# Altium footprint library Connectors.PcbLib: 60 footprints (part 2 of 4)
Each footprint in its own frame and in the unit in brackets; x right, y up, seen from the top. Pads: shape width x height; smd on the part's side, far side on the other; paste and mask are expansions set on the pad; w line width, h text height; cw(c..) or ccw(c..) is an arc to the next point about the centre after c.
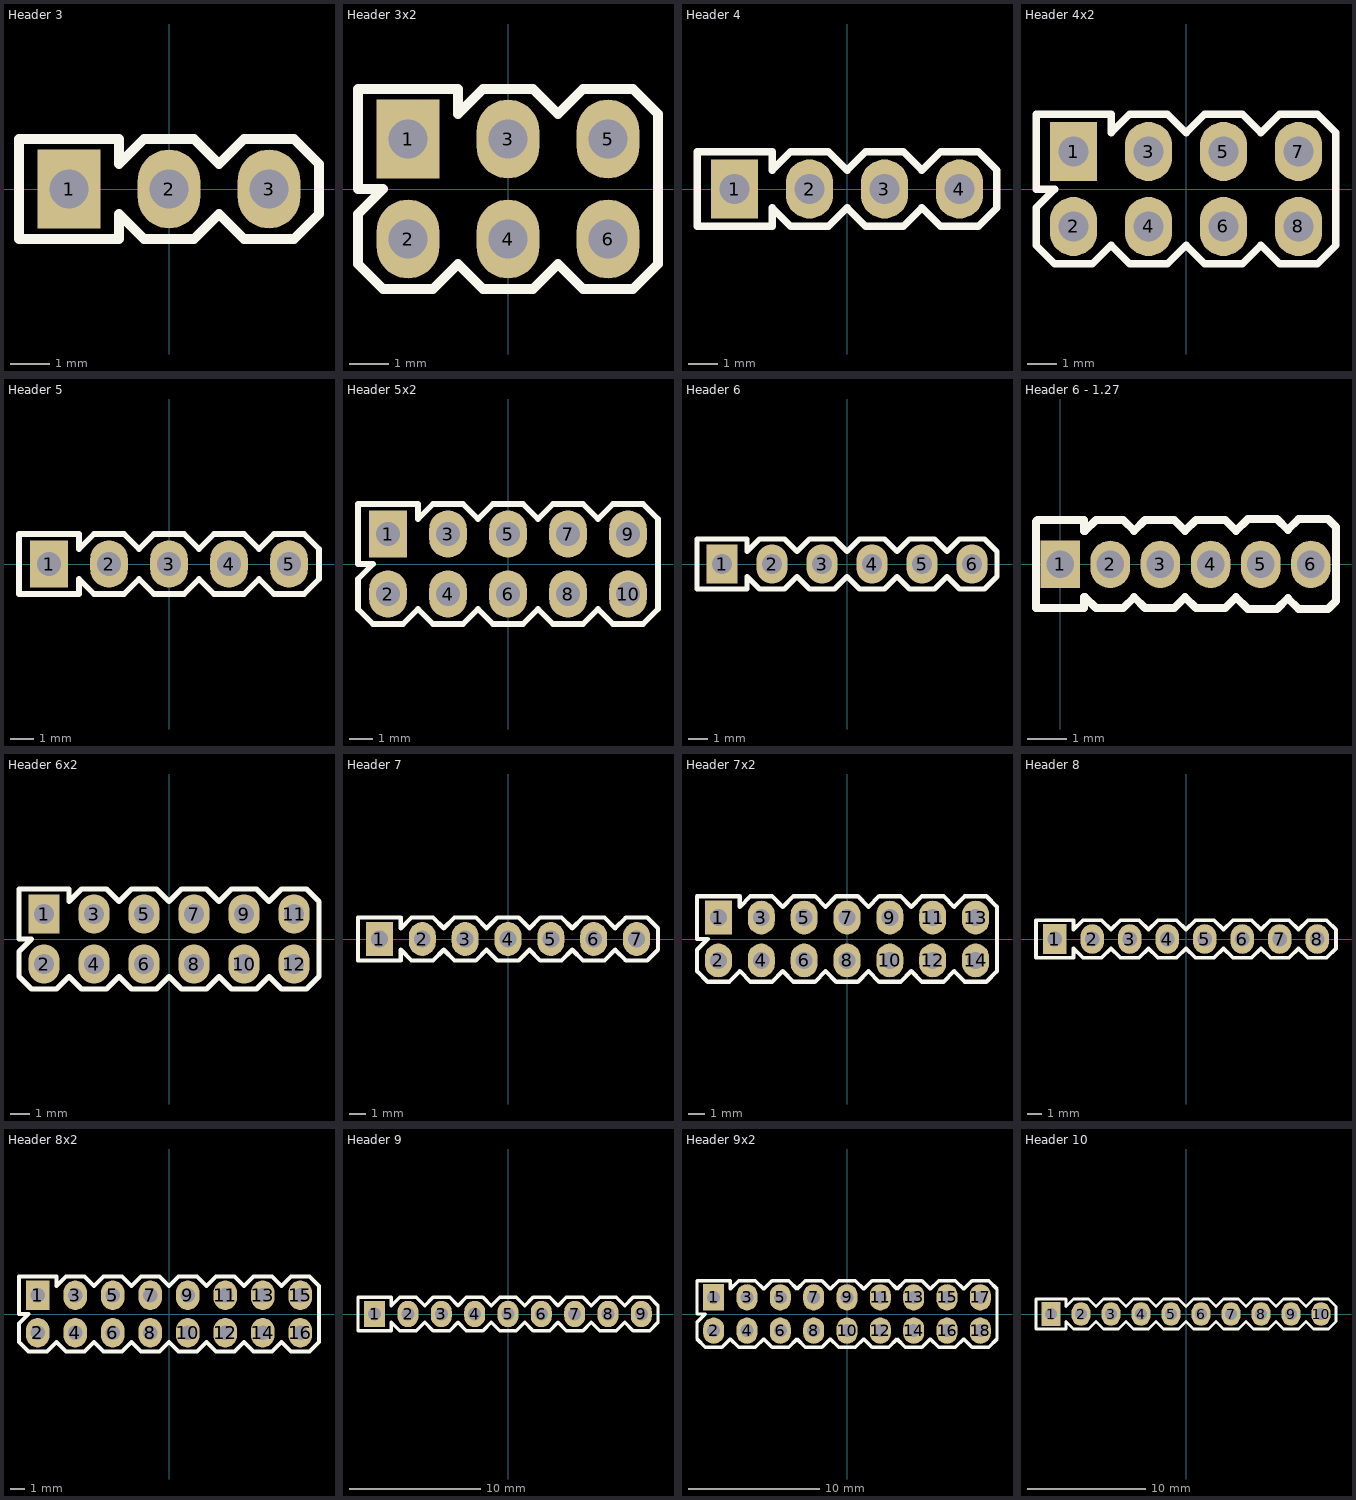
[diagram p1: the footprints below, top view; thin cyan lines are the x and y axes]

## Header 3 [mm]
pads (3):
  rect 1.6x2 hole 1: 1(-2.54,0)
  oval 1.6x2 hole 1: 2(0,0) 3(2.54,0)
Top Overlay:
  lines w0.254: -3.81,-1.27 -3.81,1.27 -1.27,1.27 -1.27,0.635 -0.635,1.27 0.635,1.27 1.27,0.635 1.905,1.27 3.175,1.27 3.81,0.635 3.81,-0.635 3.175,-1.27 1.905,-1.27 1.27,-0.635 0.635,-1.27 -0.635,-1.27 -1.27,-0.635 -1.27,-1.27 -3.81,-1.27
3D body: height 8.2, standoff -3, extent -3.771,-1.312 3.849,1.184

## Header 3x2 [mm]
pads (6):
  rect 1.6x2 hole 1: 1(-2.54,1.27)
  oval 1.6x2 hole 1: 2(-2.54,-1.27) 3(0,1.27) 4(0,-1.27) 5(2.54,1.27) 6(2.54,-1.27)
Top Overlay:
  lines w0.254: -3.81,-1.905 -3.175,-2.54 -1.905,-2.54 -1.27,-1.905 -0.635,-2.54 0.635,-2.54 1.27,-1.905 1.905,-2.54 3.175,-2.54 3.81,-1.905 3.81,-0.635 3.81,0.635 3.81,1.905 3.175,2.54 1.905,2.54 1.27,1.905 0.635,2.54 -0.635,2.54 -1.27,1.905 -1.27,2.54 -3.81,2.54 -3.81,0 -3.175,0 -3.81,-0.635 -3.81,-1.905
3D body: height 8.5, standoff -3, extent -3.81,-2.54 3.81,2.54

## Header 4 [mm]
pads (4):
  rect 1.6x2 hole 1: 1(-3.81,0)
  oval 1.6x2 hole 1: 2(-1.27,0) 3(1.27,0) 4(3.81,0)
Top Overlay:
  lines w0.254: -5.08,-1.27 -5.08,1.27 -2.54,1.27 -2.54,0.635 -1.905,1.27 -0.635,1.27 0,0.635 0.635,1.27 1.905,1.27 2.54,0.635 3.175,1.27 4.445,1.27 5.08,0.635 5.08,-0.635 4.445,-1.27 3.175,-1.27 2.54,-0.635 1.905,-1.27 0.635,-1.27 0,-0.635 -0.635,-1.27 -1.905,-1.27 -2.54,-0.635 -2.54,-1.27 -5.08,-1.27
3D body: height 8.2, standoff -3, extent -4.953,-1.27 5.207,1.226

## Header 4x2 [mm]
pads (8):
  rect 1.6x2 hole 1: 1(-3.81,1.27)
  oval 1.6x2 hole 1: 2(-3.81,-1.27) 3(-1.27,1.27) 4(-1.27,-1.27) 5(1.27,1.27) 6(1.27,-1.27) 7(3.81,1.27) 8(3.81,-1.27)
Top Overlay:
  lines w0.254: -5.08,-1.905 -5.08,-0.635 -4.445,0 -5.08,0 -5.08,2.54 -2.54,2.54 -2.54,1.905 -1.905,2.54 -0.635,2.54 0,1.905 0.635,2.54 1.905,2.54 2.54,1.905 3.175,2.54 4.445,2.54 5.08,1.905 5.08,0.635 5.08,-0.635 5.08,-1.905 4.445,-2.54 3.175,-2.54 2.54,-1.905 1.905,-2.54 0.635,-2.54 0,-1.905 -0.635,-2.54 -1.905,-2.54 -2.54,-1.905 -3.175,-2.54 -4.445,-2.54 -5.08,-1.905
3D body: height 8.5, standoff -3, extent -5.08,-2.54 5.08,2.54

## Header 5 [mm]
pads (5):
  rect 1.6x2 hole 1: 1(-5.08,0)
  oval 1.6x2 hole 1: 2(-2.54,0) 3(0,0) 4(2.54,0) 5(5.08,0)
Top Overlay:
  lines w0.254: -6.35,-1.27 -6.35,1.27 -3.81,1.27 -3.81,0.635 -3.175,1.27 -1.905,1.27 -1.27,0.635 -0.635,1.27 0.635,1.27 1.27,0.635 1.905,1.27 3.175,1.27 3.81,0.635 4.445,1.27 5.715,1.27 6.35,0.635 6.35,-0.635 5.715,-1.27 4.445,-1.27 3.81,-0.635 3.175,-1.27 1.905,-1.27 1.27,-0.635 0.635,-1.27 -0.635,-1.27 -1.27,-0.635 -1.905,-1.27 -3.175,-1.27 -3.81,-0.635 -3.81,-1.27 -6.35,-1.27
3D body: height 8.2, standoff -3, extent -6.25,-1.251 6.45,1.245

## Header 5x2 [mm]
pads (10):
  rect 1.6x2 hole 1: 1(-5.08,1.27)
  oval 1.6x2 hole 1: 2(-5.08,-1.27) 3(-2.54,1.27) 4(-2.54,-1.27) 5(0,1.27) 6(0,-1.27) 7(2.54,1.27) 8(2.54,-1.27) 9(5.08,1.27) 10(5.08,-1.27)
Top Overlay:
  lines w0.254: -6.35,-1.905 -5.715,-2.54 -4.445,-2.54 -3.81,-1.905 -3.175,-2.54 -1.905,-2.54 -1.27,-1.905 -0.635,-2.54 0.635,-2.54 1.27,-1.905 1.905,-2.54 3.175,-2.54 3.81,-1.905 4.445,-2.54 5.715,-2.54 6.35,-1.905 6.35,-0.635 6.35,0.635 6.35,1.905 5.715,2.54 4.445,2.54 3.81,1.905 3.175,2.54 1.905,2.54 1.27,1.905 0.635,2.54 -0.635,2.54 -1.27,1.905 -1.905,2.54 -3.175,2.54 -3.81,1.905 -3.81,2.54 -6.35,2.54 -6.35,0 -5.715,0 -6.35,-0.635 -6.35,-1.905
3D body: height 8.5, standoff -3, extent -6.35,-2.54 6.35,2.54

## Header 6 [mm]
pads (6):
  rect 1.6x2 hole 1: 1(-6.35,0)
  oval 1.6x2 hole 1: 2(-3.81,0) 3(-1.27,0) 4(1.27,0) 5(3.81,0) 6(6.35,0)
Top Overlay:
  lines w0.254: -7.62,-1.27 -5.08,-1.27 -5.08,-0.635 -4.445,-1.27 -3.175,-1.27 -2.54,-0.635 -1.905,-1.27 -0.635,-1.27 0,-0.635 0.635,-1.27 1.905,-1.27 2.54,-0.635 3.175,-1.27 4.445,-1.27 5.08,-0.635 5.715,-1.27 6.985,-1.27 7.62,-0.635 7.62,0.635 6.985,1.27 5.715,1.27 5.08,0.635 4.445,1.27 3.175,1.27 2.54,0.635 1.905,1.27 0.635,1.27 0,0.635 -0.635,1.27 -1.905,1.27 -2.54,0.635 -3.175,1.27 -4.445,1.27 -5.08,0.635 -5.08,1.27 -7.62,1.27 -7.62,-1.27
3D body: height 8.2, standoff -3, extent -7.52,-1.251 7.72,1.245

## Header 6 - 1.27 [mm]
pads (6):
  rect 1x1.2 hole 0.7: 1(0,0)
  oval 1x1.2 hole 0.7: 2(1.27,0) 3(2.54,0) 4(3.81,0) 5(5.08,0) 6(6.35,0)
Top Overlay:
  lines w0.2: 0.61,-0.83 0.61,-1.105 -0.61,-1.105 -0.61,1.09 -0.575,1.125 0.61,1.125 0.61,0.85 ; 0.635,-0.83 0.91,-1.105 1.6,-1.105 1.875,-0.83 2.15,-1.105 2.89,-1.105 3.165,-0.83 3.44,-1.105 4.18,-1.105 4.455,-0.83 4.73,-1.105 ; 0.635,0.85 0.91,1.125 1.6,1.125 1.875,0.85 2.15,1.125 2.89,1.125 3.165,0.85 3.44,1.125 4.18,1.125 4.455,0.85 4.73,1.125 ; 4.75,-1.13 5.49,-1.13 5.765,-0.855 6.04,-1.13 6.78,-1.13 6.985,-0.925 6.985,0.945 6.78,1.15 6.04,1.15 5.765,0.875 5.49,1.15 4.75,1.15
3D body: height 4.86, standoff -2.39, extent -0.65,-1.2 6.97,1.2

## Header 6x2 [mm]
pads (12):
  rect 1.6x2 hole 1: 1(-6.35,1.27)
  oval 1.6x2 hole 1: 2(-6.35,-1.27) 3(-3.81,1.27) 4(-3.81,-1.27) 5(-1.27,1.27) 6(-1.27,-1.27) 7(1.27,1.27) 8(1.27,-1.27) 9(3.81,1.27) 10(3.81,-1.27) 11(6.35,1.27) 12(6.35,-1.27)
Top Overlay:
  lines w0.254: -7.62,-1.905 -7.62,-0.635 -6.985,0 -7.62,0 -7.62,2.54 -5.08,2.54 -5.08,1.905 -4.445,2.54 -3.175,2.54 -2.54,1.905 -1.905,2.54 -0.635,2.54 0,1.905 0.635,2.54 1.905,2.54 2.54,1.905 3.175,2.54 4.445,2.54 5.08,1.905 5.715,2.54 6.985,2.54 7.62,1.905 7.62,0.635 7.62,-0.635 7.62,-1.905 6.985,-2.54 5.715,-2.54 5.08,-1.905 4.445,-2.54 3.175,-2.54 2.54,-1.905 1.905,-2.54 0.635,-2.54 0,-1.905 -0.635,-2.54 -1.905,-2.54 -2.54,-1.905 -3.175,-2.54 -4.445,-2.54 -5.08,-1.905 -5.715,-2.54 -6.985,-2.54 -7.62,-1.905
3D body: height 8.5, standoff -3, extent -7.62,-2.54 7.62,2.54

## Header 7 [mm]
pads (7):
  rect 1.6x2 hole 1: 1(-7.62,0)
  oval 1.6x2 hole 1: 2(-5.08,0) 3(-2.54,0) 4(0,0) 5(2.54,0) 6(5.08,0) 7(7.62,0)
Top Overlay:
  lines w0.254: -8.89,-1.27 -8.89,1.27 -6.35,1.27 -6.35,0.635 -5.715,1.27 -4.445,1.27 -3.81,0.635 -3.175,1.27 -1.905,1.27 -1.27,0.635 -0.635,1.27 0.635,1.27 1.27,0.635 1.905,1.27 3.175,1.27 3.81,0.635 4.445,1.27 5.715,1.27 6.35,0.635 6.985,1.27 8.255,1.27 8.89,0.635 8.89,-0.635 8.255,-1.27 6.985,-1.27 6.35,-0.635 5.715,-1.27 4.445,-1.27 3.81,-0.635 3.175,-1.27 1.905,-1.27 1.27,-0.635 0.635,-1.27 -0.635,-1.27 -1.27,-0.635 -1.905,-1.27 -3.175,-1.27 -3.81,-0.635 -4.445,-1.27 -5.715,-1.27 -6.35,-0.635 -6.35,-1.27 -8.89,-1.27
3D body: height 8.2, standoff -3, extent -8.79,-1.251 8.99,1.245

## Header 7x2 [mm]
pads (14):
  rect 1.6x2 hole 1: 1(-7.62,1.27)
  oval 1.6x2 hole 1: 2(-7.62,-1.27) 3(-5.08,1.27) 4(-5.08,-1.27) 5(-2.54,1.27) 6(-2.54,-1.27) 7(0,1.27) 8(0,-1.27) 9(2.54,1.27) 10(2.54,-1.27) 11(5.08,1.27) 12(5.08,-1.27) 13(7.62,1.27) 14(7.62,-1.27)
Top Overlay:
  lines w0.254: -8.89,-1.905 -8.89,-0.635 -8.255,0 -8.89,0 -8.89,2.54 -6.35,2.54 -6.35,1.905 -5.715,2.54 -4.445,2.54 -3.81,1.905 -3.175,2.54 -1.905,2.54 -1.27,1.905 -0.635,2.54 0.635,2.54 1.27,1.905 1.905,2.54 3.175,2.54 3.81,1.905 4.445,2.54 5.715,2.54 6.35,1.905 6.985,2.54 8.255,2.54 8.89,1.905 8.89,-1.905 8.255,-2.54 6.985,-2.54 6.35,-1.905 5.715,-2.54 4.445,-2.54 3.81,-1.905 3.175,-2.54 1.905,-2.54 1.27,-1.905 0.635,-2.54 -0.635,-2.54 -1.27,-1.905 -1.905,-2.54 -3.175,-2.54 -3.81,-1.905 -4.445,-2.54 -5.715,-2.54 -6.35,-1.905 -6.985,-2.54 -8.255,-2.54 -8.89,-1.905
3D body: height 8.5, standoff -3, extent -8.89,-2.54 8.89,2.54

## Header 8 [mm]
pads (8):
  rect 1.6x2 hole 1: 1(-8.89,0)
  oval 1.6x2 hole 1: 2(-6.35,0) 3(-3.81,0) 4(-1.27,0) 5(1.27,0) 6(3.81,0) 7(6.35,0) 8(8.89,0)
Top Overlay:
  lines w0.254: -10.16,-1.27 -10.16,1.27 -7.62,1.27 -7.62,0.635 -6.985,1.27 -5.715,1.27 -5.08,0.635 -4.445,1.27 -3.175,1.27 -2.54,0.635 -1.905,1.27 -0.635,1.27 0,0.635 0.635,1.27 1.905,1.27 2.54,0.635 3.175,1.27 4.445,1.27 5.08,0.635 5.715,1.27 6.985,1.27 7.62,0.635 8.255,1.27 9.525,1.27 10.16,0.635 10.16,-0.635 9.525,-1.27 8.255,-1.27 7.62,-0.635 6.985,-1.27 5.715,-1.27 5.08,-0.635 4.445,-1.27 3.175,-1.27 2.54,-0.635 1.905,-1.27 0.635,-1.27 0,-0.635 -0.635,-1.27 -1.905,-1.27 -2.54,-0.635 -3.175,-1.27 -4.445,-1.27 -5.08,-0.635 -5.715,-1.27 -6.985,-1.27 -7.62,-0.635 -7.62,-1.27 -10.16,-1.27
3D body: height 8.2, standoff -3, extent -10.06,-1.251 10.26,1.245

## Header 8x2 [mm]
pads (16):
  rect 1.6x2 hole 1: 1(-8.89,1.27)
  oval 1.6x2 hole 1: 2(-8.89,-1.27) 3(-6.35,1.27) 4(-6.35,-1.27) 5(-3.81,1.27) 6(-3.81,-1.27) 7(-1.27,1.27) 8(-1.27,-1.27) 9(1.27,1.27) 10(1.27,-1.27) 11(3.81,1.27) 12(3.81,-1.27) 13(6.35,1.27) 14(6.35,-1.27) 15(8.89,1.27) 16(8.89,-1.27)
Top Overlay:
  lines w0.254: -10.16,-1.905 -9.525,-2.54 -8.255,-2.54 -7.62,-1.905 -6.985,-2.54 -5.715,-2.54 -5.08,-1.905 -4.445,-2.54 -3.175,-2.54 -2.54,-1.905 -1.905,-2.54 -0.635,-2.54 0,-1.905 0.635,-2.54 1.905,-2.54 2.54,-1.905 3.175,-2.54 4.445,-2.54 5.08,-1.905 5.715,-2.54 6.985,-2.54 7.62,-1.905 8.255,-2.54 9.525,-2.54 10.16,-1.905 10.16,1.905 9.525,2.54 8.255,2.54 7.62,1.905 6.985,2.54 5.715,2.54 5.08,1.905 4.445,2.54 3.175,2.54 2.54,1.905 1.905,2.54 0.635,2.54 0,1.905 -0.635,2.54 -1.905,2.54 -2.54,1.905 -3.175,2.54 -4.445,2.54 -5.08,1.905 -5.715,2.54 -6.985,2.54 -7.62,1.905 -7.62,2.54 -10.16,2.54 -10.16,0 -9.525,0 -10.16,-0.635 -10.16,-1.905
3D body: height 8.5, standoff -3, extent -10.16,-2.54 10.16,2.54

## Header 9 [mm]
pads (9):
  rect 1.6x2 hole 1: 1(-10.16,0)
  oval 1.6x2 hole 1: 2(-7.62,0) 3(-5.08,0) 4(-2.54,0) 5(0,0) 6(2.54,0) 7(5.08,0) 8(7.62,0) 9(10.16,0)
Top Overlay:
  lines w0.254: -11.43,-1.27 -11.43,1.27 -8.89,1.27 -8.89,0.635 -8.255,1.27 -6.985,1.27 -6.35,0.635 -5.715,1.27 -4.445,1.27 -3.81,0.635 -3.175,1.27 -1.905,1.27 -1.27,0.635 -0.635,1.27 0.635,1.27 1.27,0.635 1.905,1.27 3.175,1.27 3.81,0.635 4.445,1.27 5.715,1.27 6.35,0.635 6.985,1.27 8.255,1.27 8.89,0.635 9.525,1.27 10.795,1.27 11.43,0.635 11.43,-0.635 10.795,-1.27 9.525,-1.27 8.89,-0.635 8.255,-1.27 6.985,-1.27 6.35,-0.635 5.715,-1.27 4.445,-1.27 3.81,-0.635 3.175,-1.27 1.905,-1.27 1.27,-0.635 0.635,-1.27 -0.635,-1.27 -1.27,-0.635 -1.905,-1.27 -3.175,-1.27 -3.81,-0.635 -4.445,-1.27 -5.715,-1.27 -6.35,-0.635 -6.985,-1.27 -8.255,-1.27 -8.89,-0.635 -8.89,-1.27 -11.43,-1.27
3D body: height 8.2, standoff -3, extent -11.33,-1.251 11.53,1.245

## Header 9x2 [mm]
pads (18):
  rect 1.6x2 hole 1: 1(-10.16,1.27)
  oval 1.6x2 hole 1: 2(-10.16,-1.27) 3(-7.62,1.27) 4(-7.62,-1.27) 5(-5.08,1.27) 6(-5.08,-1.27) 7(-2.54,1.27) 8(-2.54,-1.27) 9(0,1.27) 10(0,-1.27) 11(2.54,1.27) 12(2.54,-1.27) 13(5.08,1.27) 14(5.08,-1.27) 15(7.62,1.27) 16(7.62,-1.27) 17(10.16,1.27) 18(10.16,-1.27)
Top Overlay:
  lines w0.254: -11.43,-1.905 -10.795,-2.54 -9.525,-2.54 -8.89,-1.905 -8.255,-2.54 -6.985,-2.54 -6.35,-1.905 -5.715,-2.54 -4.445,-2.54 -3.81,-1.905 -3.175,-2.54 -1.905,-2.54 -1.27,-1.905 -0.635,-2.54 0.635,-2.54 1.27,-1.905 1.905,-2.54 3.175,-2.54 3.81,-1.905 4.445,-2.54 5.715,-2.54 6.35,-1.905 6.985,-2.54 8.255,-2.54 8.89,-1.905 9.525,-2.54 10.795,-2.54 11.43,-1.905 11.43,1.905 10.795,2.54 9.525,2.54 8.89,1.905 8.255,2.54 6.985,2.54 6.35,1.905 5.715,2.54 4.445,2.54 3.81,1.905 3.175,2.54 1.905,2.54 1.27,1.905 0.635,2.54 -0.635,2.54 -1.27,1.905 -1.905,2.54 -3.175,2.54 -3.81,1.905 -4.445,2.54 -5.715,2.54 -6.35,1.905 -6.985,2.54 -8.255,2.54 -8.89,1.905 -8.89,2.54 -11.43,2.54 -11.43,0 -10.795,0 -11.43,-0.635 -11.43,-1.905
3D body: height 8.5, standoff -3, extent -11.43,-2.54 11.43,2.54

## Header 10 [mm]
pads (10):
  rect 1.6x2 hole 1: 1(-11.43,0)
  oval 1.6x2 hole 1: 2(-8.89,0) 3(-6.35,0) 4(-3.81,0) 5(-1.27,0) 6(1.27,0) 7(3.81,0) 8(6.35,0) 9(8.89,0) 10(11.43,0)
Top Overlay:
  lines w0.254: -12.7,-1.27 -12.7,1.27 -10.16,1.27 -10.16,0.635 -9.525,1.27 -8.255,1.27 -7.62,0.635 -6.985,1.27 -5.715,1.27 -5.08,0.635 -4.445,1.27 -3.175,1.27 -2.54,0.635 -1.905,1.27 -0.635,1.27 0,0.635 0.635,1.27 1.905,1.27 2.54,0.635 3.175,1.27 4.445,1.27 5.08,0.635 5.715,1.27 6.985,1.27 7.62,0.635 8.255,1.27 9.525,1.27 10.16,0.635 10.795,1.27 12.065,1.27 12.7,0.635 12.7,-0.635 12.065,-1.27 10.795,-1.27 10.16,-0.635 9.525,-1.27 8.255,-1.27 7.62,-0.635 6.985,-1.27 5.715,-1.27 5.08,-0.635 4.445,-1.27 3.175,-1.27 2.54,-0.635 1.905,-1.27 0.635,-1.27 0,-0.635 -0.635,-1.27 -1.905,-1.27 -2.54,-0.635 -3.175,-1.27 -4.445,-1.27 -5.08,-0.635 -5.715,-1.27 -6.985,-1.27 -7.62,-0.635 -8.255,-1.27 -9.525,-1.27 -10.16,-0.635 -10.16,-1.27 -12.7,-1.27
3D body: height 8.2, standoff -3, extent -12.573,-1.251 12.827,1.245